# Altium schematic symbol library LD39050PUR.SchLib: 1 symbol
Pins are listed as number, name and electrical type; pins without a type are passive.

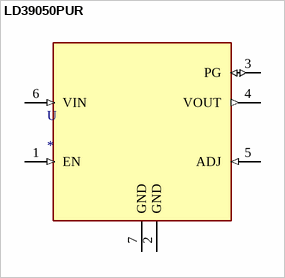
[diagram p0: symbol LD39050PUR]

## LD39050PUR
designator U
Linear Voltage Regulator IC 1 Output 500mA 6-DFN _3x3_; MP: LD39050PUR; MF: STMicroelectronics; Package: DFN-6 STMicroelectronics; SnapEDA_Link: https://www.snapeda.com/parts/LD39050PUR/STMicroelectronics/view-part/493713/?ref=snap; Value: *; Digi-Key_Part_Number: 497-8717-1-ND; Digi-Key_Purchase_URL: https://www.digikey.com/product-detail/en/stmicroelectronics/LD39050PUR/497-8717-1-ND/2039902?utm_source=snapeda&utm_medium=aggregator&utm_campaign=symbol; ComponentLink1Description: Digikey link; ComponentLink1URL: https://www.digikey.com/en/products/detail/LD39050PUR/497-8717-1-ND/2039902
footprint SON95P300X300X100-7N
pins: 1 EN (in), 2 GND (power), 3 PG (io), 4 VOUT (out), 5 ADJ (in), 6 VIN (in), 7 GND (power)